# Altium integrated library 25SVPF100M.IntLib: 1 symbol
Pins are listed as number, name and electrical type; pins without a type are passive.

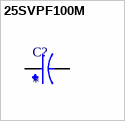
[diagram p0: symbol 25SVPF100M]

## 25SVPF100M
designator C?
CAP, ALU ELEC, POLYMER, 100UF, 25V, SMD; Capacitance: 100ÂµF; Voltage(DC): 25V; Capacitor Case / Package: Radial Can - SMD; ESR: 0.024ohm; Lifetime @ Temperature: 5000 hours @ 105Â°C; Capacitance Tolerance: Â± 68AC5714; MF: Panasonic; MP: 25SVPF100M.; SnapEDA_Link: https://www.snapeda.com/parts/25SVPF100M./Panasonic/view-part/?ref=snap; Package: None; Value: *; Check_prices: https://www.snapeda.com/parts/25SVPF100M./Panasonic/view-part/?ref=eda
footprint CAP_25SVPF100M
pins: 1, 2